# Altium footprint library LNA.PcbLib: 11 footprints
Each footprint in its own frame and in the unit in brackets; x right, y up, seen from the top. Pads: shape width x height; smd on the part's side, far side on the other; paste and mask are expansions set on the pad; w line width, h text height; cw(c..) or ccw(c..) is an arc to the next point about the centre after c.
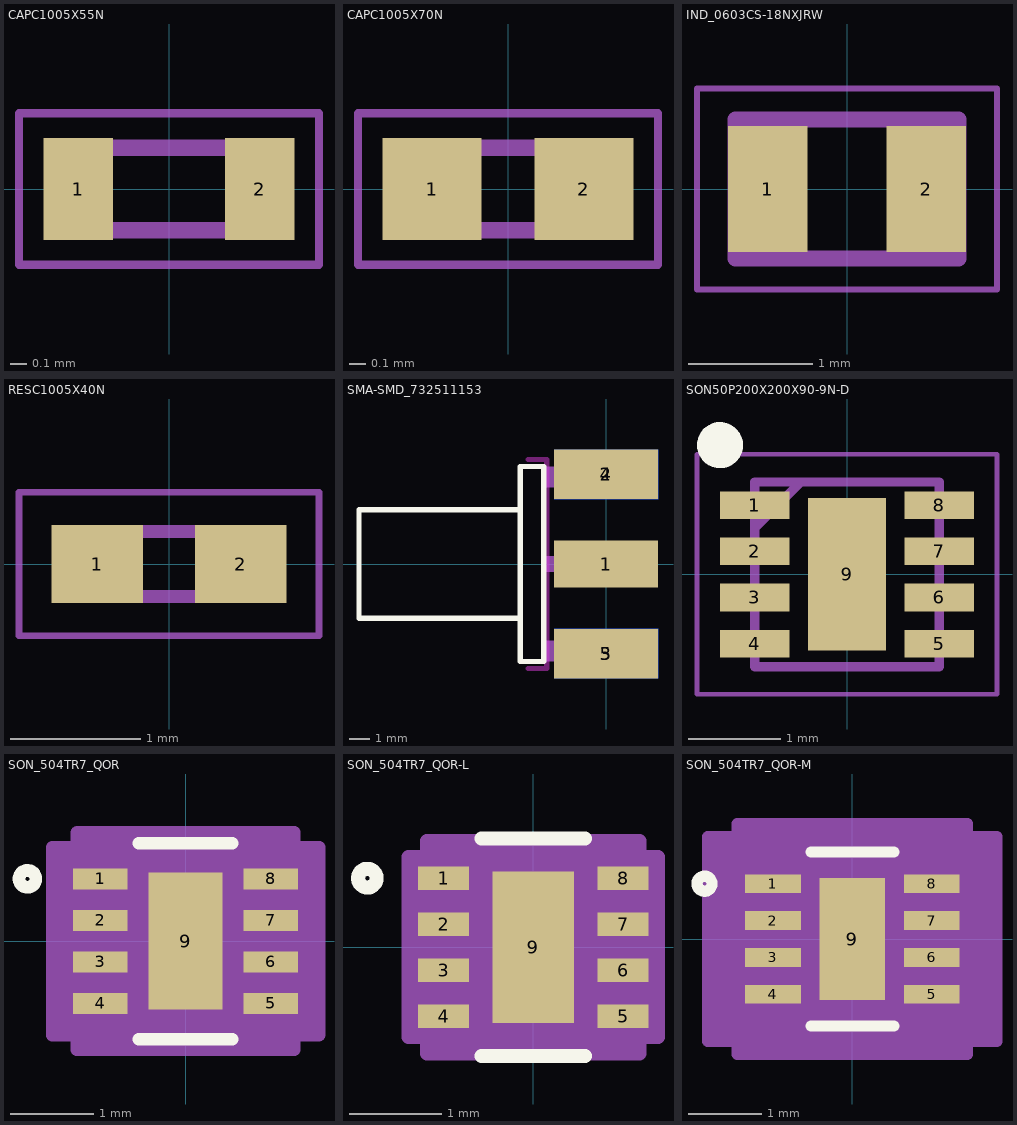
[diagram p0: the footprints below, top view; thin cyan lines are the x and y axes]

## CAPC1005X55N [mm]
pads (2):
  rect 0.42x0.62 smd: 1(-0.55,0) 2(0.55,0)
Mechanical 13:
  lines w0.1: -0.5,-0.25 -0.5,0.25 0.5,0.25 0.5,-0.25 -0.5,-0.25
Mechanical 15:
  lines w0.05: -0.91,-0.46 -0.91,0.46 0.91,0.46 0.91,-0.46 -0.91,-0.46
3D body "CGA2B2X8R2A222K050BA.stp": height 0.55, standoff 0, extent -0.5,-0.25 0.5,0.25

## CAPC1005X70N [mm]
pads (2):
  rect 0.6x0.62 smd: 1(-0.46,0) 2(0.46,0)
Mechanical 13:
  lines w0.1: -0.5,-0.25 -0.5,0.25 0.5,0.25 0.5,-0.25 -0.5,-0.25
Mechanical 15:
  lines w0.05: -0.91,-0.46 -0.91,0.46 0.91,0.46 0.91,-0.46 -0.91,-0.46
3D body "GRM1555C1H102JA01J.stp": height 0.5, standoff 0, extent -0.5,-0.25 0.5,0.25

## IND_0603CS-18NXJRW [mm]
height 1.02
pads (2):
  rect 0.64x1.02 smd: 1(-0.64,0) 2(0.64,0)
Mechanical 13:
  lines w0.127: -0.9,-0.56 0.9,-0.56 0.9,0.56 -0.9,0.56 -0.9,-0.56
Mechanical 15:
  lines w0.05: -1.21,-0.81 1.21,-0.81 1.21,0.81 -1.21,0.81 -1.21,-0.81

## PCBComponent_1 [mm]

## PCBComponent_1 - duplicate [mm]

## RESC1005X40N [mm]
pads (2):
  rect 0.7x0.6 smd: 1(-0.55,0) 2(0.55,0)
Mechanical 13:
  lines w0.1: -0.5,-0.25 -0.5,0.25 0.5,0.25 0.5,-0.25 -0.5,-0.25
Mechanical 15:
  lines w0.05: -1.15,-0.55 -1.15,0.55 1.15,0.55 1.15,-0.55 -1.15,-0.55
3D body "CRCW04021K62FKEDHP.stp": height 0.4, standoff 0, extent -0.5,-0.25 0.5,0.25

## SMA-SMD_732511153 [mm]
pads (5):
  rect 5.08x2.29 smd: 1(0,0)
  rect 5.08x2.42 smd: 2(0,4.38) 3(0,-4.38)
  rect 5.08x2.42 smd far side: 4(0,4.38) 5(0,-4.38)
Top Overlay:
  lines w0.254: -4.19,-4.76 -3.04,-4.76 -3.04,4.76 -4.19,4.76 -4.19,-4.75 ; -4.19,-2.65 -12.07,-2.65 -12.07,2.651 -4.19,2.651
Keep-Out Layer:
  lines w0.254: -3.8,-5.1 -2.9,-5.1 -2.9,5.1 -3.8,5.1
Mechanical 2:
  region: -4.19,-2.7 -12.07,-2.7 -12.095,-2.693 -12.113,-2.675 -12.12,-2.65 -12.12,2.65 -12.113,2.675 -12.095,2.693 -12.07,2.7 -4.19,2.7 -4.161,2.69 -4.142,2.665 -4.142,2.635 -4.161,2.609 -4.19,2.6 -12.02,2.6 -12.02,-2.6 -4.19,-2.6 -4.161,-2.609 -4.142,-2.635 -4.142,-2.665 -4.161,-2.69 -4.19,-2.7
Mechanical 6:
  lines w0.051: -12.07,-2.65 -4.19,-2.65 -4.19,-4.76 -3.04,-4.76 -3.04,3.75 -3.04,4.76 -4.19,4.76 -4.19,2.65 -12.07,2.65 -12.07,-2.65
Mechanical 8:
  region: 2.27,4.76 2.27,4.735 2.235,4.7 2.185,4.7 2.15,4.735 2.15,4.76 2.15,4.785 2.185,4.82 2.235,4.82 2.27,4.785 2.27,4.76
Mechanical 9:
  region: 2.21,4.76 2.21,3.75 -3.09,3.75 -3.09,4.76
  region: -3.09,-4.76 -3.09,-3.75 2.21,-3.75 2.21,-4.76
  region: 2.21,0.38 2.21,-0.38 -3.1,-0.38 -3.1,0.38
  region: -3.09,-4.76 -3.09,-3.75 2.21,-3.75 2.21,-4.76
  region: 2.21,4.76 2.21,3.75 -3.09,3.75 -3.09,4.76
3D body "732511153.stp": height 3.96, standoff -3.96, extent -12.065,-4.763 2.21,4.763

## SON50P200X200X90-9N-D [mm]
pads (9):
  rect 0.75x0.3 smd: 1(-1,0.75) 2(-1,0.25) 3(-1,-0.25) 4(-1,-0.75) 5(1,-0.75) 6(1,-0.25) 7(1,0.25) 8(1,0.75)
  rect 0.85x1.65 smd: 9(0,0)
Top Overlay:
  circle w0.25: c-1.375,1.4 r0.125
Mechanical 13:
  lines w0.1: -1,0.5 -0.5,1 ; -1,-1 -1,1 1,1 1,-1 -1,-1
Mechanical 15:
  lines w0.05: -1.625,-1.3 -1.625,1.3 1.625,1.3 1.625,-1.3 -1.625,-1.3
3D body "QPL9504TR7.stp": height 0.85, standoff 0, extent -1.014,-1 1.014,1

## SON_504TR7_QOR [mil]
pads (9):
  rect 25.81x10.03 smd paste+0 mask+0: 1(-40.41,29.54) 2(-40.41,9.85) 3(-40.41,-9.85) 4(-40.41,-29.54) 5(40.41,-29.54) 6(40.41,-9.85) 7(40.41,9.85) 8(40.41,29.54)
  rect 35x65 smd paste+0 mask+0: 9(0,0)
Top Overlay:
  circle w6: c-75,29.54 r4
  lines w6: -22.13,-46.5 22.13,-46.5 ; -22.13,46.5 22.13,46.5
  text ".Designator" at -137.5,-25 h50
Mechanical 13:
  circle w1: c-27.5,29.54 r3
  lines w1: -12,41.5 ccw(c0,41.5) 12,41.5 ; -41.5,-41.5 -41.5,41.5 41.5,41.5 41.5,-41.5 -41.5,-41.5
  text ".Designator" at -137.5,-25 h50
Mechanical 15:
  region: -51.5,-44.55 -63.31,-44.55 -63.31,44.55 -51.5,44.55 -51.5,51.5 51.5,51.5 51.5,44.55 63.31,44.55 63.31,-44.55 51.5,-44.55 51.5,-51.5 -51.5,-51.5
  lines w6: -63.31,-44.55 -51.5,-44.55 -51.5,-51.5 51.5,-51.5 51.5,-44.55 63.31,-44.55 63.31,44.55 51.5,44.55 51.5,51.5 -51.5,51.5 -51.5,44.55 -63.31,44.55 -63.31,-44.55
3D body "SON_504TR7_QOR.step": height 35.12, standoff 0, extent -41.5,-41.5 41.5,41.5

## SON_504TR7_QOR-L [mil]
pads (9):
  rect 21.87x10.03 smd paste+0 mask+0: 1(-38.44,29.54) 2(-38.44,9.85) 3(-38.44,-9.85) 4(-38.44,-29.54) 5(38.44,-29.54) 6(38.44,-9.85) 7(38.44,9.85) 8(38.44,29.54)
  rect 35x65 smd paste+0 mask+0: 9(0,0)
Top Overlay:
  circle w6: c-71.06,29.54 r4
  lines w6: -22.13,-46.5 22.13,-46.5 ; -22.13,46.5 22.13,46.5
  text ".Designator" at -137.5,-25 h50
Mechanical 13:
  circle w1: c-27.5,29.54 r3
  lines w1: -12,41.5 ccw(c0,41.5) 12,41.5 ; -41.5,-41.5 -41.5,41.5 41.5,41.5 41.5,-41.5 -41.5,-41.5
  text ".Designator" at -137.5,-25 h50
Mechanical 15:
  region: -45.5,-38.55 -53.37,-38.55 -53.37,38.55 -45.5,38.55 -45.5,45.5 45.5,45.5 45.5,38.55 53.37,38.55 53.37,-38.55 45.5,-38.55 45.5,-45.5 -45.5,-45.5
  lines w6: -53.37,-38.55 -45.5,-38.55 -45.5,-45.5 45.5,-45.5 45.5,-38.55 53.37,-38.55 53.37,38.55 45.5,38.55 45.5,45.5 -45.5,45.5 -45.5,38.55 -53.37,38.55 -53.37,-38.55
3D body "SON_504TR7_QOR.step": height 35.12, standoff 0, extent -41.5,-41.5 41.5,41.5

## SON_504TR7_QOR-M [mil]
pads (9):
  rect 29.75x10.03 smd paste+0 mask+0: 1(-42.37,29.54) 2(-42.37,9.85) 3(-42.37,-9.85) 4(-42.37,-29.54) 5(42.37,-29.54) 6(42.37,-9.85) 7(42.37,9.85) 8(42.37,29.54)
  rect 35x65 smd paste+0 mask+0: 9(0,0)
Top Overlay:
  circle w6: c-78.94,29.54 r4
  lines w6: -22.13,-46.5 22.13,-46.5 ; -22.13,46.5 22.13,46.5
  text ".Designator" at -137.5,-25 h50
Mechanical 13:
  circle w1: c-27.5,29.54 r3
  lines w1: -12,41.5 ccw(c0,41.5) 12,41.5 ; -41.5,-41.5 41.5,-41.5 41.5,41.5 -41.5,41.5 -41.5,-41.5
  text ".Designator" at -137.5,-25 h50
Mechanical 15:
  region: -61.5,-54.55 -77.25,-54.55 -77.25,54.55 -61.5,54.55 -61.5,61.5 61.5,61.5 61.5,54.55 77.25,54.55 77.25,-54.55 61.5,-54.55 61.5,-61.5 -61.5,-61.5
  lines w6: -77.25,-54.55 -77.25,54.55 -61.5,54.55 -61.5,61.5 61.5,61.5 61.5,54.55 77.25,54.55 77.25,-54.55 61.5,-54.55 61.5,-61.5 -61.5,-61.5 -61.5,-54.55 -77.25,-54.55
3D body "SON_504TR7_QOR.step": height 35.12, standoff 0, extent -41.5,-41.5 41.5,41.5